# Altium footprint library Baro.PcbLib: 1 footprints
Each footprint in its own frame and in the unit in brackets; x right, y up, seen from the top. Pads: shape width x height; smd on the part's side, far side on the other; paste and mask are expansions set on the pad; w line width, h text height; cw(c..) or ccw(c..) is an arc to the next point about the centre after c.
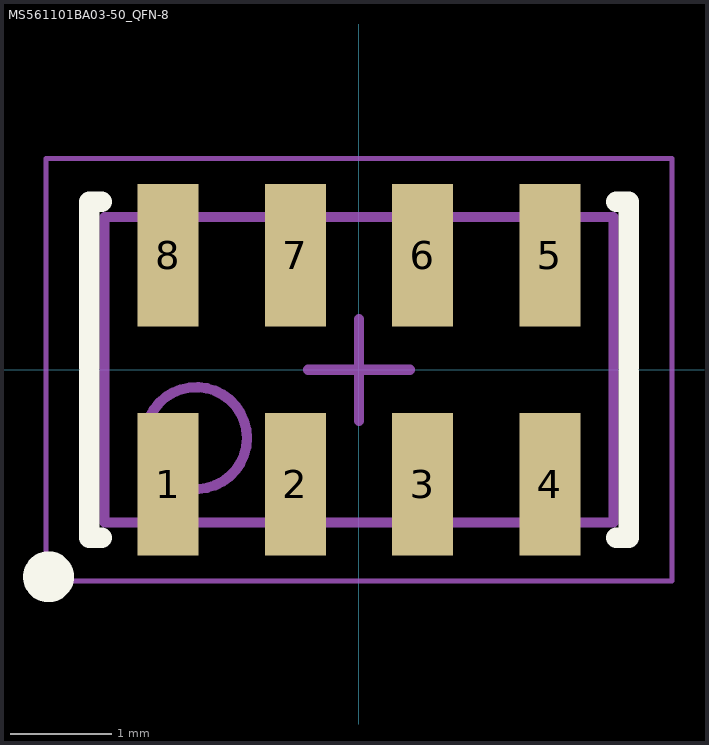
[diagram p0: the footprint, top view; thin cyan lines are the x and y axes]

## MS561101BA03-50_QFN-8 [mm] "QFN, 8-Leads, Body 5.00x3.00mm, Pitch 1.25mm, IPC Medium Density"
height 1
pads (8):
  rect 0.6x1.4 smd: 1(-1.875,-1.125) 2(-0.625,-1.125) 3(0.625,-1.125) 4(1.875,-1.125) 5(1.875,1.125) 6(0.625,1.125) 7(-0.625,1.125) 8(-1.875,1.125)
Top Overlay:
  circle w0.25: c-3.048,-2.032 r0.125
  lines w0.2: -2.65,-0.025 -2.65,-1.65 -2.525,-1.65 ; -2.65,0.025 -2.65,1.65 -2.525,1.65 ; 2.525,-1.65 2.65,-1.65 2.65,-0.025 ; 2.525,1.65 2.65,1.65 2.65,0.025
Top Designator:
  text ".Designator" at -5.998,-0.4 h1.2
Mechanical 13:
  circle w0.1: c-1.6,-0.67 r0.5
  lines w0.1: -2.5,-1.5 2.5,-1.5 2.5,1.5 -2.5,1.5 -2.5,-1.5
Mechanical 15:
  lines w0.05: -3.075,-2.075 3.075,-2.075 3.075,2.075 -3.075,2.075 -3.075,-2.075
  lines w0.1: -0.5,0 0.5,0 ; 0,-0.5 0,0.5
3D body "MS561101BA03-50.stp": height 1, standoff 0.05, extent -2.5,-1.5 2.5,1.5